# EAGLE library part SN74AUP1G97DCKR (library astra)
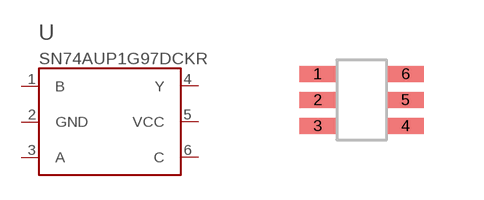
[diagram p16: symbol with the pads of TI_DCK6_SENSE; footprint TI_DCK6_SENSE]

Designator prefix U

## SN74AUP1G97DCKR  [TI_DCK6_SENSE]
1  B  in
2  GND  pwr
3  A  in
4  Y  out
5  VCC  pwr
6  C  in

## Footprint TI_DCK6_SENSE (pad centres in mm)
TI TPS22919 DCK0006A PCB layout.
smd 0.9 x 0.4: 1 -1.1,0.65; 2 -1.1,0; 3 -1.1,-0.65; 4 1.1,-0.65; 5 1.1,0; 6 1.1,0.65